# Altium footprint library for_Lamp.PcbLib: 22 footprints (part 2 of 2)
Each footprint in its own frame and in the unit in brackets; x right, y up, seen from the top. Pads: shape width x height; smd on the part's side, far side on the other; paste and mask are expansions set on the pad; w line width, h text height; cw(c..) or ccw(c..) is an arc to the next point about the centre after c.
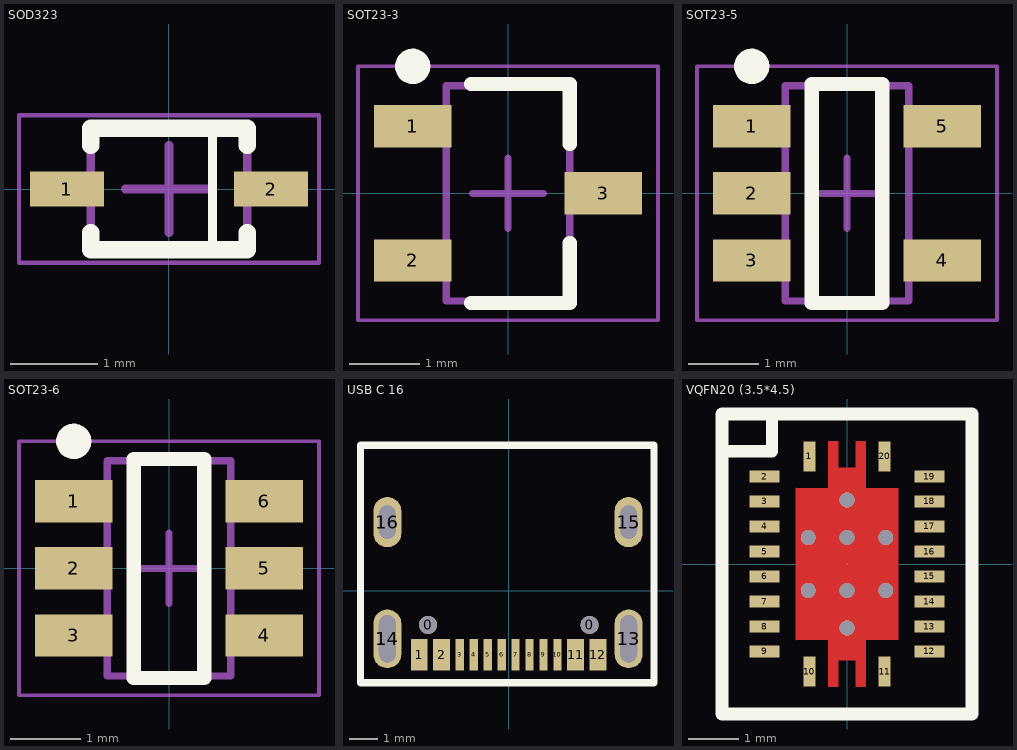
[diagram p1: the footprints below, top view; thin cyan lines are the x and y axes]

## SOD323 [mm]
pads (2):
  rect 0.85x0.4 smd: 1(-1.175,0) 2(1.175,0)
Top Overlay:
  lines w0.1: 0.5,-0.7 0.5,0.7
  lines w0.2: -0.9,-0.5 -0.9,-0.7 0.9,-0.7 0.9,-0.5 ; -0.9,0.5 -0.9,0.7 0.9,0.7 0.9,0.5
Mechanical 13:
  lines w0.1: -0.9,-0.7 0.9,-0.7 0.9,0.7 -0.9,0.7 -0.9,-0.7
Mechanical 15:
  lines w0.05: -1.725,-0.85 1.725,-0.85 1.725,0.85 -1.725,0.85 -1.725,-0.85
  lines w0.1: -0.5,0 0.5,0 ; 0,-0.5 0,0.5
3D body "SOD323.step": height 1, standoff 0, extent -1.3,-0.7 1.3,0.7

## SOT23-3 [mm]
height 1.1
pads (3):
  rect 1.1x0.6 smd: 1(-1.35,0.95) 2(-1.35,-0.95) 3(1.35,0)
Top Overlay:
  circle w0.25: c-1.35,1.8 r0.125
  lines w0.2: -0.525,-1.55 0.875,-1.55 0.875,-0.7 ; -0.525,1.55 0.875,1.55 0.875,0.7
Mechanical 13:
  lines w0.1: -0.875,-1.525 -0.875,1.525 0.875,1.525 0.875,-1.525 -0.875,-1.525
Mechanical 15:
  lines w0.05: -2.125,-1.8 -2.125,1.8 2.125,1.8 2.125,-1.8 -2.125,-1.8
  lines w0.1: -0.5,0 0.5,0 ; 0,-0.5 0,0.5
3D body "SOT23127P600-8N.step": height 1.1, standoff 0, extent -1.525,-1.525 1.525,1.525

## SOT23-5 [mm]
height 1.1
pads (5):
  rect 1.1x0.6 smd: 1(-1.35,0.95) 2(-1.35,0) 3(-1.35,-0.95) 4(1.35,-0.95) 5(1.35,0.95)
Top Overlay:
  circle w0.25: c-1.35,1.8 r0.125
  lines w0.2: -0.5,-1.55 -0.5,1.55 0.5,1.55 0.5,-1.55 -0.5,-1.55
Mechanical 13:
  lines w0.1: -0.875,-1.525 0.875,-1.525 0.875,1.525 -0.875,1.525 -0.875,-1.525
Mechanical 15:
  lines w0.05: -2.125,-1.8 2.125,-1.8 2.125,1.8 -2.125,1.8 -2.125,-1.8
  lines w0.1: -0.5,0 0.5,0 ; 0,-0.5 0,0.5
3D body "SOT23127P600-8N.step": height 1.1, standoff 0, extent -1.525,-1.525 1.525,1.525

## SOT23-6 [mm]
height 1.1
pads (6):
  rect 1.1x0.6 smd: 1(-1.35,0.95) 2(-1.35,0) 3(-1.35,-0.95) 4(1.35,-0.95) 5(1.35,0) 6(1.35,0.95)
Top Overlay:
  circle w0.25: c-1.35,1.8 r0.125
  lines w0.2: -0.5,-1.55 -0.5,1.55 0.5,1.55 0.5,-1.55 -0.5,-1.55
Mechanical 13:
  lines w0.1: -0.875,-1.525 0.875,-1.525 0.875,1.525 -0.875,1.525 -0.875,-1.525
Mechanical 15:
  lines w0.05: -2.125,-1.8 2.125,-1.8 2.125,1.8 -2.125,1.8 -2.125,-1.8
  lines w0.1: -0.5,0 0.5,0 ; 0,-0.5 0,0.5
3D body "SOT23127P600-8N.step": height 1.1, standoff 0, extent -1.525,-1.525 1.525,1.525

## USB C 16 [mm]
pads (18):
  round 0.65 hole 0.65: 0(-2.885,-1.23) 0(2.895,-1.23)
  rect 0.6x1.14 smd: 1(-3.205,-2.3) 2(-2.405,-2.3) 11(2.395,-2.3) 12(3.195,-2.3)
  rect 0.3x1.14 smd: 3(-1.755,-2.3) 4(-1.255,-2.3) 5(-0.755,-2.3) 6(-0.255,-2.3) 7(0.245,-2.3) 8(0.745,-2.3) 9(1.245,-2.3) 10(1.745,-2.3)
  oval 1x2.1 hole 1.7 slot 0.6 at 0 deg: 13(4.295,-1.73) 14(-4.345,-1.73)
  oval 1x1.8 hole 1.2 slot 0.6 at 0 deg: 15(4.295,2.45) 16(-4.345,2.45)
Top Overlay:
  lines w0.254: -5.305,-3.3 5.195,-3.3 5.195,5.2 -5.305,5.2 -5.305,-3.3
3D body "USB C 16.STEP": height 3.26, standoff -1, extent -4.475,-2.67 4.465,5.08

## VQFN20 (3.5*4.5) [mm] "For BQ24070"
pads (21):
  rect 0.24x0.6 smd: 1(-0.75,2.15) 10(-0.75,-2.15) 11(0.75,-2.15) 20(0.75,2.15)
  rect 0.6x0.24 smd: 2(-1.65,1.75) 3(-1.65,1.25) 4(-1.65,0.75) 5(-1.65,0.25) 6(-1.65,-0.25) 7(-1.65,-0.75) 8(-1.65,-1.25) 9(-1.65,-1.75) 12(1.65,-1.75) 13(1.65,-1.25) 14(1.65,-0.75) 15(1.65,-0.25) 16(1.65,0.25) 17(1.65,0.75) 18(1.65,1.25) 19(1.65,1.75)
  round 0.025 smd: 20(0,0)
via 0,1.275 diameter 0.3 hole 0.3
via -0.775,-0.525 diameter 0.3 hole 0.3
via 0,-0.525 diameter 0.3 hole 0.3
via 0.775,-0.525 diameter 0.3 hole 0.3
via -0.775,0.525 diameter 0.3 hole 0.3
via 0,0.525 diameter 0.3 hole 0.3
via 0.775,0.525 diameter 0.3 hole 0.3
via 0,-1.275 diameter 0.3 hole 0.3
Top Layer:
  region: -1.025,1.525 -1.025,-1.525 -0.375,-1.52 -0.375,-2.45 -0.175,-2.45 -0.175,-1.925 0.175,-1.925 0.175,-2.45 0.375,-2.45 0.375,-1.52 1.025,-1.52 1.025,1.52 0.375,1.52 0.375,2.45 0.175,2.45 0.175,1.925 -0.175,1.925 -0.175,2.45 -0.375,2.45 -0.375,1.52
Top Overlay:
  lines w0.25: -2.5,2.25 -1.5,2.25 -1.5,2.5 -1.5,3 ; -2.5,2 -2.5,2
  lines w0.254: -2.5,-3 2.5,-3 2.5,3 -2.5,3 -2.5,-3
3D body "User Library-VQFN-20-2.step": height 1, standoff 0, extent -1.76,-2.26 1.76,2.26